# Altium footprint library TD-102-G-AA.PcbLib: 1 footprints
Each footprint in its own frame and in the unit in brackets; x right, y up, seen from the top. Pads: shape width x height; smd on the part's side, far side on the other; paste and mask are expansions set on the pad; w line width, h text height; cw(c..) or ccw(c..) is an arc to the next point about the centre after c.
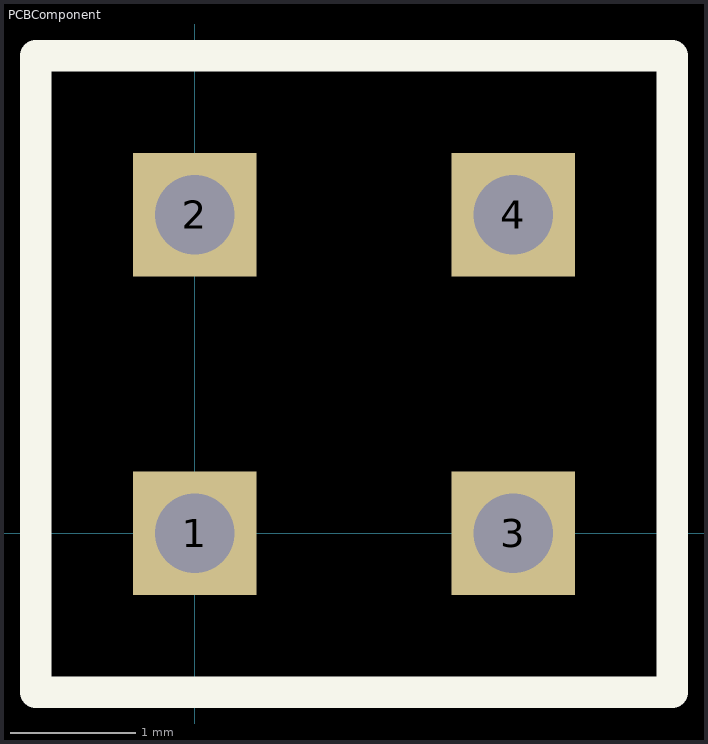
[diagram p0: the footprint, top view; thin cyan lines are the x and y axes]

## PCBComponent [mm]
pads (4):
  rect 0.985x0.985 / inner round 0.985 / far side rect 0.985x0.985 hole 0.635: 1(0,0) 2(0,2.54) 3(2.54,0) 4(2.54,2.54)
Top Overlay:
  lines w0.254: -1.27,-1.27 -1.27,3.81 3.81,3.81 3.81,-1.27 -1.27,-1.27
3D body "TD-102-G-AA.stp": height 8.28, standoff -3.84, extent -1.194,-1.27 3.734,3.81